# Altium schematic symbol library TC2030-IDC.SchLib: 1 symbol
Pins are listed as number, name and electrical type; pins without a type are passive.

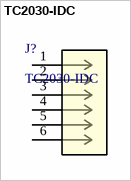
[diagram p0: symbol TC2030-IDC]

## TC2030-IDC
designator J?
Description; Manufacturer_Name: Tag-Connect; Copyright: Copyright (C) 2025 Ultra Librarian. All rights reserved.; Manufacturer_Part_Number: TC2030-IDC; RefDes: RefDes; Type: Type
footprint CONN_TC2030-IDC_TGC
pins: 1, 2, 3, 4, 5, 6